# Altium integrated library SSW-120-01-G-D.IntLib: 1 symbol
Pins are listed as number, name and electrical type; pins without a type are passive.

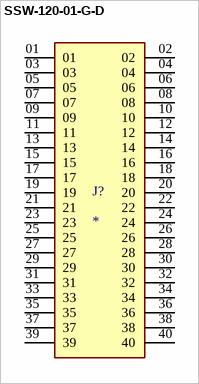
[diagram p0: symbol SSW-120-01-G-D]

## SSW-120-01-G-D
designator J?
MF: Samtec; MP: SSW-120-01-G-D; Package: None; Availability: Unavailable; Value: *; Price: None
footprint SAMTEC_SSW-120-01-G-D
pins: 01, 02, 03, 04, 05, 06, 07, 08, 09, 10, 11, 12, 13, 14, 15, 16, 17, 18, 19, 20, 21, 22, 23, 24, 25, 26, 27, 28, 29, 30, 31, 32, 33, 34, 35, 36, 37, 38, 39, 40